# Altium footprint library AN54LM-P20_PCB-260723.PcbLib: 1 footprints
Each footprint in its own frame and in the unit in brackets; x right, y up, seen from the top. Pads: shape width x height; smd on the part's side, far side on the other; paste and mask are expansions set on the pad; w line width, h text height; cw(c..) or ccw(c..) is an arc to the next point about the centre after c.
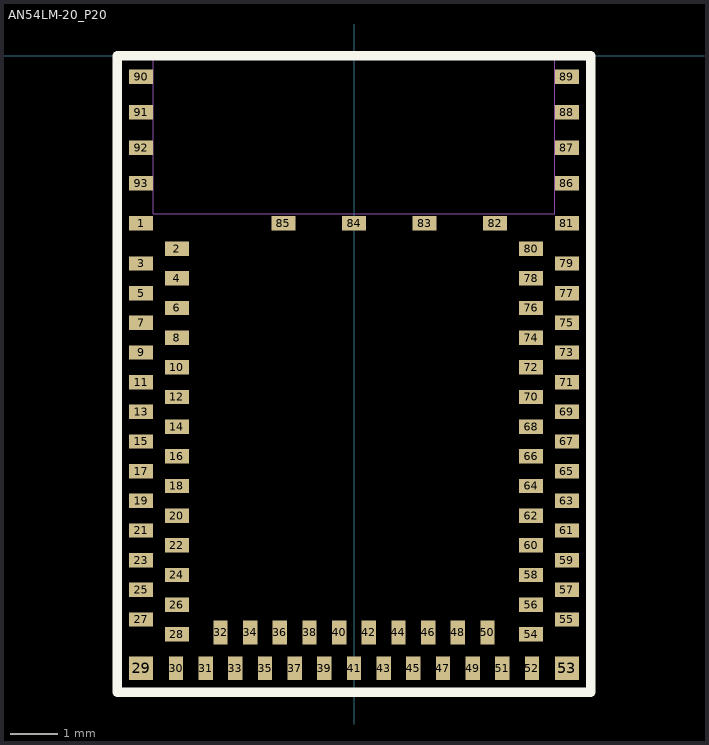
[diagram p0: the footprint, top view; thin cyan lines are the x and y axes]

## AN54LM-20_P20 [mm]
pads (93):
  rect 0.5x0.3 smd mask+0: 1(-4.45,-3.5) 2(-3.7,-4.03) 3(-4.45,-4.34) 4(-3.7,-4.65) 5(-4.45,-4.96) 6(-3.7,-5.27) 7(-4.45,-5.58) 8(-3.7,-5.89) 9(-4.45,-6.2) 10(-3.7,-6.51) 11(-4.45,-6.82) 12(-3.7,-7.13) 13(-4.45,-7.44) 14(-3.7,-7.75) 15(-4.45,-8.06) 16(-3.7,-8.37) 17(-4.45,-8.68) 18(-3.7,-8.99) 19(-4.45,-9.3) 20(-3.7,-9.61) 21(-4.45,-9.92) 22(-3.7,-10.23) 23(-4.45,-10.54) 24(-3.7,-10.85) 25(-4.45,-11.16) 26(-3.7,-11.47) 27(-4.45,-11.78) 28(-3.7,-12.09) 54(3.7,-12.09) 55(4.45,-11.78) 56(3.7,-11.47) 57(4.45,-11.16) 58(3.7,-10.85) 59(4.45,-10.54) 60(3.7,-10.23) 61(4.45,-9.92) 62(3.7,-9.61) 63(4.45,-9.3) 64(3.7,-8.99) 65(4.45,-8.68) 66(3.7,-8.37) 67(4.45,-8.06) 68(3.7,-7.75) 69(4.45,-7.44) 70(3.7,-7.13) 71(4.45,-6.82) 72(3.7,-6.51) 73(4.45,-6.2) 74(3.7,-5.89) 75(4.45,-5.58) 76(3.7,-5.27) 77(4.45,-4.96) 78(3.7,-4.65) 79(4.45,-4.34) 80(3.7,-4.03) 81(4.45,-3.5) 82(2.95,-3.5) 83(1.475,-3.5) 84(0,-3.5) 85(-1.475,-3.5) 86(4.45,-2.66) 87(4.45,-1.92) 88(4.45,-1.18) 89(4.45,-0.44) 90(-4.45,-0.44) 91(-4.45,-1.18) 92(-4.45,-1.92) 93(-4.45,-2.66)
  rect 0.5x0.5 smd mask+0: 29(-4.45,-12.8) 53(4.45,-12.8)
  rect 0.3x0.5 smd mask+0: 30(-3.72,-12.8) 31(-3.1,-12.8) 32(-2.79,-12.05) 33(-2.48,-12.8) 34(-2.17,-12.05) 35(-1.86,-12.8) 36(-1.55,-12.05) 37(-1.24,-12.8) 38(-0.93,-12.05) 39(-0.62,-12.8) 40(-0.31,-12.05) 41(0,-12.8) 42(0.31,-12.05) 43(0.62,-12.8) 44(0.93,-12.05) 45(1.24,-12.8) 46(1.55,-12.05) 47(1.86,-12.8) 48(2.17,-12.05) 49(2.48,-12.8) 50(2.79,-12.05) 51(3.1,-12.8) 52(3.72,-12.8)
TopOverlay:
  lines w0.2: -4.95,-13.3 4.95,-13.3 4.95,0 0,0 -4.95,0 -4.95,-13.3
Mechanical2:
  lines w0.01: -4.2,-3.3 -4.2,0 4.2,0 4.2,-3.3 -4.2,-3.3
  text "No ground pad" at -2.75,-2.125 h0.45